# Altium footprint library Connectors.PcbLib: 228 footprints (part 7 of 15)
Each footprint in its own frame and in the unit in brackets; x right, y up, seen from the top. Pads: shape width x height; smd on the part's side, far side on the other; paste and mask are expansions set on the pad; w line width, h text height; cw(c..) or ccw(c..) is an arc to the next point about the centre after c.
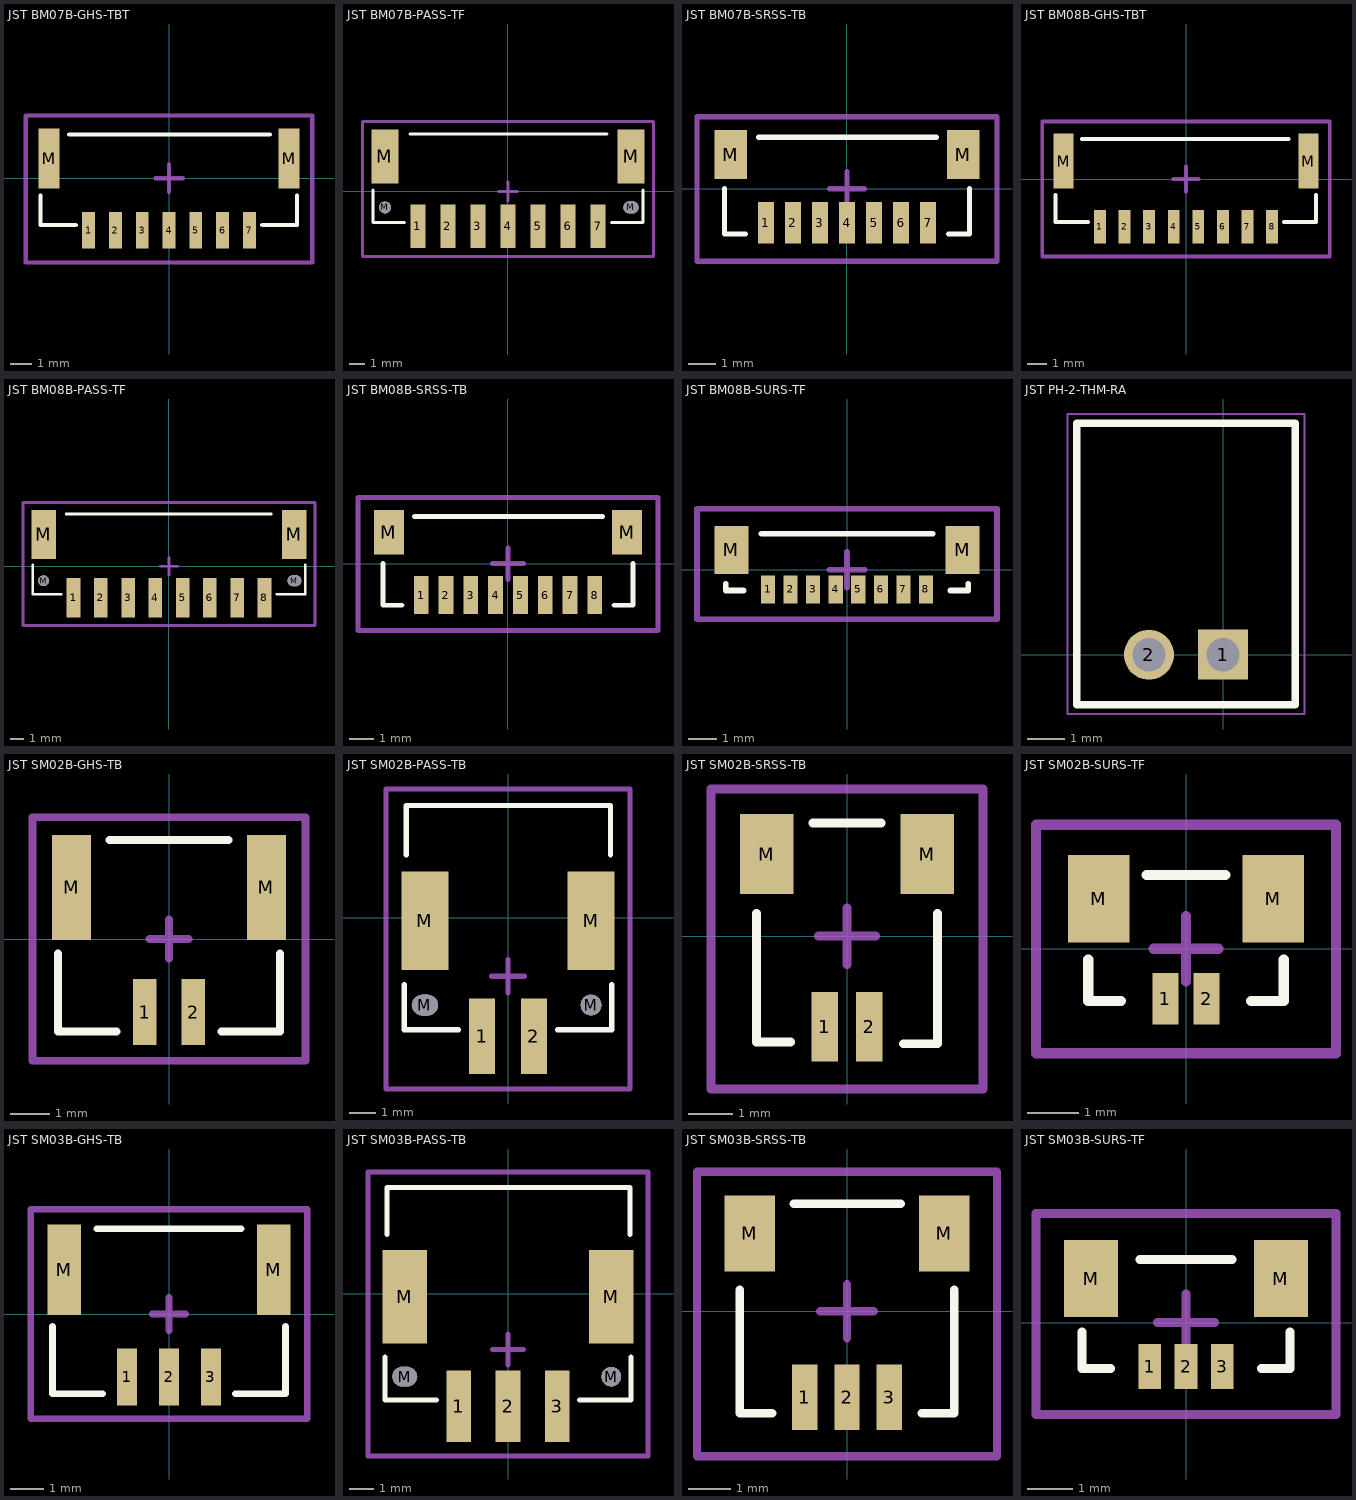
[diagram p6: the footprints below, top view; thin cyan lines are the x and y axes]

## JST BM07B-GHS-TBT [mm] "JST GH Series 1.25mm pitch, top entry connector"
height 4.5
pads (9):
  rect 0.6x1.7 smd: 1(-3.75,-2.437) 2(-2.5,-2.437) 3(-1.25,-2.437) 4(0,-2.437) 5(1.25,-2.437) 6(2.5,-2.437) 7(3.75,-2.437)
  rect 1x2.8 smd: M(-5.6,0.913) M(5.6,0.913)
Top Overlay:
  lines w0.2: -6,-0.812 -6,-2.187 -4.35,-2.187 ; -4.659,2.032 4.699,2.032 ; 4.35,-2.187 5.975,-2.187 5.975,-0.812
Top Courtyard:
  lines w0.2: -0.635,0 0.635,0 ; 0,-0.635 0,0.635 ; -6.681,-3.937 -6.681,2.921 6.681,2.921 6.681,-3.937 -6.681,-3.937
3D body "JST BM07B-GHS-TBT.STEP": height 4.18, standoff -0.03, extent -6,-2.918 6,2.032

## JST BM07B-PASS-TF [mm] "JST PA Series 2mm pitch, top entry connector"
height 11.1
pads (11):
  rect 1x2.9 smd: 1(-6,-2.325) 2(-4,-2.325) 3(-2,-2.325) 4(0,-2.325) 5(2,-2.325) 6(4,-2.325) 7(6,-2.325)
  round 0.8 hole 0.8 unplated mask+0.102: M(-8.2,-1.075)
  rect 1.8x3.6 smd: M(-8.2,2.325) M(8.2,2.325)
  oval 1x0.8 hole 0.8 slot 1 at 0 deg unplated mask+0.102: M(8.2,-1.075)
Top Overlay:
  lines w0.2: -9,0.075 -9,-2.075 -6.905,-2.075 ; -6.54,3.81 6.604,3.81 ; 6.905,-2.075 9,-2.075 9,0.075
Top Courtyard:
  lines w0.2: -0.635,-0.015 0.635,-0.015 ; 0,-0.65 0,0.62 ; -9.699,-4.357 9.699,-4.357 9.699,4.66 -9.699,4.66 -9.699,-4.357
3D body "JST BM07B-PASS-TF.STEP": height 9, standoff 0, extent -9,-3.225 9,3.875

## JST BM07B-SRSS-TB [mm] "1.0mm pitch/Disconnectable Crimp style connector"
height 2.95
pads (9):
  rect 0.6x1.55 smd: 1(-3,-1.262) 2(-2,-1.262) 3(-1,-1.262) 4(0,-1.262) 5(1,-1.262) 6(2,-1.262) 7(3,-1.262)
  rect 1.2x1.8 smd: M(-4.3,1.262) M(4.3,1.262)
Top Overlay:
  lines w0.2: -4.532,0.008 -4.532,-1.676 -3.77,-1.676 ; -3.27,1.905 3.302,1.905 ; 3.77,-1.676 4.532,-1.676 4.532,0.008
Top Courtyard:
  lines w0.2: -0.635,0 0.635,0 ; 0,-0.635 0,0.635 ; -5.548,-2.692 5.548,-2.692 5.548,2.667 -5.548,2.667 -5.548,-2.692
3D body "JST BM07B-SRSS-TB.STEP": height 4.32, standoff 0, extent -4.5,-1.688 4.5,1.912

## JST BM08B-GHS-TBT [mm] "JST GH Series 1.25mm pitch, top entry connector"
height 4.5
pads (10):
  rect 0.6x1.7 smd: 1(-4.375,-2.437) 2(-3.125,-2.437) 3(-1.875,-2.437) 4(-0.625,-2.437) 5(0.625,-2.437) 6(1.875,-2.437) 7(3.125,-2.437) 8(4.375,-2.437)
  rect 1x2.8 smd: M(-6.225,0.913) M(6.225,0.913)
Top Overlay:
  lines w0.2: -6.625,-0.812 -6.625,-2.187 -4.975,-2.187 ; -5.284,2.032 5.207,2.032 ; 4.975,-2.187 6.6,-2.187 6.6,-0.812
Top Courtyard:
  lines w0.2: -0.635,0 0.635,0 ; 0,-0.635 0,0.635 ; -7.306,-3.937 7.306,-3.937 7.306,2.921 -7.306,2.921 -7.306,-3.937
3D body "JST BM08B-GHS-TBT.STEP": height 4.18, standoff -0.03, extent -6.625,-2.918 6.625,2.032

## JST BM08B-PASS-TF [mm] "JST PA Series 2mm pitch, top entry connector"
height 11.1
pads (12):
  rect 1x2.9 smd: 1(-7,-2.325) 2(-5,-2.325) 3(-3,-2.325) 4(-1,-2.325) 5(1,-2.325) 6(3,-2.325) 7(5,-2.325) 8(7,-2.325)
  round 0.8 hole 0.8 unplated mask+0.102: M(-9.2,-1.075)
  rect 1.8x3.6 smd: M(-9.2,2.325) M(9.2,2.325)
  oval 1x0.8 hole 0.8 slot 1 at 0 deg unplated mask+0.102: M(9.2,-1.075)
Top Overlay:
  lines w0.2: -10,0.075 -10,-2.075 -7.905,-2.075 ; -7.54,3.81 7.493,3.81 ; 7.905,-2.075 10,-2.075 10,0.075
Top Courtyard:
  lines w0.2: -0.635,-0.015 0.635,-0.015 ; 0,-0.65 0,0.62 ; -10.699,-4.357 -10.699,4.66 10.699,4.66 10.699,-4.357 -10.699,-4.357
3D body "JST BM08B-PASS-TF.STEP": height 9, standoff 0, extent -10,-3.225 10,3.875

## JST BM08B-SRSS-TB [mm] "1.0mm pitch/Disconnectable Crimp style connector"
height 2.95
pads (10):
  rect 0.6x1.55 smd: 1(-3.5,-1.262) 2(-2.5,-1.262) 3(-1.5,-1.262) 4(-0.5,-1.262) 5(0.5,-1.262) 6(1.5,-1.262) 7(2.5,-1.262) 8(3.5,-1.262)
  rect 1.2x1.8 smd: M(-4.8,1.262) M(4.8,1.262)
Top Overlay:
  lines w0.2: -5.032,0.008 -5.032,-1.676 -4.27,-1.676 ; -3.77,1.905 3.81,1.905 ; 4.27,-1.676 5.032,-1.676 5.032,0.008
Top Courtyard:
  lines w0.2: -0.635,0 0.635,0 ; 0,-0.635 0,0.635 ; -6.048,-2.692 6.048,-2.692 6.048,2.667 -6.048,2.667 -6.048,-2.692
3D body "JST BM08B-SRSS-TB.STEP": height 4.32, standoff 0, extent -5,-1.688 5,1.912

## JST BM08B-SURS-TF [mm] "1.0mm pitch/Disconnectable Crimp style connector"
height 3.95
pads (10):
  rect 0.5x1 smd: 1(-2.8,-0.7) 2(-2,-0.7) 3(-1.2,-0.7) 4(-0.4,-0.7) 5(0.4,-0.7) 6(1.2,-0.7) 7(2,-0.7) 8(2.8,-0.7)
  rect 1.2x1.7 smd: M(-4.1,0.7) M(4.1,0.7)
Top Overlay:
  lines w0.2: -4.305,-0.5 -4.305,-0.741 -3.67,-0.741 ; -3.035,1.27 3.048,1.27 ; 3.67,-0.741 4.305,-0.741 4.305,-0.5
Top Courtyard:
  lines w0.2: -0.635,0 0.635,0 ; 0,-0.635 0,0.635 ; -5.321,-1.757 -5.321,2.159 5.321,2.159 5.321,-1.757 -5.321,-1.757
3D body "JST BM08B-SURS-TF.STEP": height 2.75, standoff 0, extent -4.3,-1.016 4.3,1.234

## JST PH-2-THM-RA [mm]
pads (2):
  rect 1.35x1.35 hole 0.9: 1(0,0)
  round 1.35 hole 0.9: 2(-2,0)
Top Overlay:
  lines w0.2: -3.95,-1.35 1.95,-1.35 1.95,6.25 -3.95,6.25 -3.95,-1.35
Top Component Outline:
  lines w0.1: -3.95,-1.35 -3.95,6.25 1.95,6.25 1.95,-1.35 -3.95,-1.35
Top Courtyard:
  lines w0.05: -4.2,-1.6 -4.2,6.5 2.2,6.5 2.2,-1.6 -4.2,-1.6
3D body "JST PH-2-THM-RA.step": height 4.9, standoff -3.3, extent -4,-1.35 1.9,6.25

## JST SM02B-GHS-TB [mm] "1.25mm pitch/Disconnectable Crimp style connectors"
height 4.35
pads (4):
  rect 0.6x1.7 smd: 1(-0.625,-1.875) 2(0.625,-1.875)
  rect 1x2.7 smd: M(-2.5,1.325) M(2.5,1.325)
Top Overlay:
  lines w0.2: -2.85,-0.375 -2.85,-2.375 -1.35,-2.375 ; -1.524,2.54 1.524,2.54 ; 1.35,-2.375 2.85,-2.375 2.85,-0.375
Top Courtyard:
  lines w0.2: -0.5,0 0.5,0 ; 0,-0.5 0,0.5 ; -3.5,-3.125 3.5,-3.125 3.5,3.125 -3.5,3.125 -3.5,-3.125
3D body: height 4.35, standoff 0, extent -2.875,-2.31 2.875,2.54

## JST SM02B-PASS-TB [mm] "JST PA Series 2mm pitch, side entry connector"
height 5.7
pads (6):
  rect 1x2.9 smd: 1(-1,-4.575) 2(1,-4.575)
  oval 1x0.8 hole 0.8 slot 1 at 0 deg unplated mask+0.102: M(-3.2,-3.375)
  rect 1.8x3.8 smd: M(-3.2,-0.125) M(3.2,-0.125)
  round 0.8 hole 0.8 unplated mask+0.102: M(3.2,-3.375)
Top Overlay:
  lines w0.2: -4,-2.575 -4,-4.325 -1.905,-4.325 ; -3.921,2.41 -3.921,4.315 3.953,4.315 3.953,2.41 ; 1.905,-4.325 4,-4.325 4,-2.575
Top Courtyard:
  lines w0.2: -0.635,-2.265 0.635,-2.265 ; 0,-2.9 0,-1.63 ; -4.699,-6.607 4.699,-6.607 4.699,4.953 -4.699,4.953 -4.699,-6.607
3D body "JST SM02B-PASS-TB.STEP": height 5.8, standoff 0, extent -4,-5.641 4,4.359

## JST SM02B-SRSS-TB [mm] "1.0mm pitch/Disconnectable Crimp style connector"
height 2.95
pads (4):
  rect 0.6x1.55 smd: 1(-0.5,-2.032) 2(0.5,-2.032)
  rect 1.2x1.8 smd: M(-1.8,1.843) M(1.8,1.843)
Top Overlay:
  lines w0.2: -2.032,0.508 -2.032,-2.372 -1.27,-2.372 ; -0.762,2.54 0.762,2.54 ; 1.27,-2.413 2.032,-2.413 2.032,0.508
Top Courtyard:
  lines w0.2: -0.635,0 0.635,0 ; 0,-0.635 0,0.635 ; -3.048,-3.429 -3.048,3.302 3.048,3.302 3.048,-3.429 -3.048,-3.429
3D body "JST SM02B-SRSS-TB.STEP": height 2.95, standoff -0.01, extent -2,-2.383 2,2.567

## JST SM02B-SURS-TF [mm] "1.0mm pitch/Disconnectable Crimp style connector"
height 2.95
pads (4):
  rect 0.5x1 smd: 1(-0.4,-0.975) 2(0.4,-0.975)
  rect 1.2x1.7 smd: M(-1.7,0.975) M(1.7,0.975)
Top Overlay:
  lines w0.2: -1.905,-0.213 -1.905,-1.016 -1.27,-1.016 ; -0.762,1.438 0.762,1.438 ; 1.27,-1.016 1.905,-1.016 1.905,-0.213
Top Courtyard:
  lines w0.2: -0.635,0 0.635,0 ; 0,-0.635 0,0.635 ; -2.921,-2.032 -2.921,2.413 2.921,2.413 2.921,-2.032 -2.921,-2.032
3D body "JST SM02B-SURS-TF.STEP": height 1.75, standoff 0, extent -1.9,-1.262 1.9,1.438

## JST SM03B-GHS-TB [mm] "1.25mm pitch/Disconnectable Crimp style connectors"
height 4.35
pads (5):
  rect 0.6x1.7 smd: 1(-1.25,-1.875) 2(0,-1.875) 3(1.25,-1.875)
  rect 1x2.7 smd: M(-3.125,1.325) M(3.125,1.325)
Top Overlay:
  lines w0.2: -3.475,-0.375 -3.475,-2.375 -1.975,-2.375 ; -2.149,2.54 2.159,2.54 ; 1.975,-2.375 3.475,-2.375 3.475,-0.375
Top Courtyard:
  lines w0.2: -0.5,0 0.5,0 ; 0,-0.5 0,0.5 ; -4.125,-3.125 4.125,-3.125 4.125,3.125 -4.125,3.125 -4.125,-3.125
3D body "JST SM03B-GHS-TB.STEP": height 4.35, standoff 0, extent -3.5,-2.31 3.5,2.54

## JST SM03B-PASS-TB [mm] "JST PA Series 2mm pitch, side entry connector"
height 5.7
pads (7):
  rect 1x2.9 smd: 1(-2,-4.575) 2(0,-4.575) 3(2,-4.575)
  oval 1x0.8 hole 0.8 slot 1 at 0 deg unplated mask+0.102: M(-4.2,-3.375)
  rect 1.8x3.8 smd: M(-4.2,-0.125) M(4.2,-0.125)
  round 0.8 hole 0.8 unplated mask+0.102: M(4.2,-3.375)
Top Overlay:
  lines w0.2: -5,-2.575 -5,-4.325 -2.905,-4.325 ; -4.921,2.41 -4.921,4.315 4.953,4.315 4.953,2.41 ; 2.905,-4.325 5,-4.325 5,-2.575
Top Courtyard:
  lines w0.2: -0.635,-2.265 0.635,-2.265 ; 0,-2.9 0,-1.63 ; -5.699,-6.607 -5.699,4.953 5.699,4.953 5.699,-6.607 -5.699,-6.607
3D body "JST SM03B-PASS-TB.STEP": height 5.8, standoff 0, extent -5,-5.641 5,4.359

## JST SM03B-SRSS-TB [mm] "1.0mm pitch/Disconnectable Crimp style connector"
height 2.95
pads (5):
  rect 0.6x1.55 smd: 1(-1,-2.032) 2(0,-2.032) 3(1,-2.032)
  rect 1.2x1.8 smd: M(-2.3,1.843) M(2.3,1.843)
Top Overlay:
  lines w0.2: -2.532,0.508 -2.532,-2.413 -1.77,-2.413 ; -1.262,2.54 1.27,2.54 ; 1.77,-2.413 2.532,-2.413 2.532,0.508
Top Courtyard:
  lines w0.2: -0.635,0 0.635,0 ; 0,-0.635 0,0.635 ; -3.548,-3.429 -3.548,3.302 3.548,3.302 3.548,-3.429 -3.548,-3.429
3D body "JST SM03B-SRSS-TB.STEP": height 2.95, standoff -0.01, extent -2.5,-2.383 2.5,2.567

## JST SM03B-SURS-TF [mm] "1.0mm pitch/Disconnectable Crimp style connector"
height 2.95
pads (5):
  rect 0.5x1 smd: 1(-0.8,-0.975) 2(0,-0.975) 3(0.8,-0.975)
  rect 1.2x1.7 smd: M(-2.1,0.975) M(2.1,0.975)
Top Overlay:
  lines w0.2: -2.305,-0.213 -2.305,-1.016 -1.67,-1.016 ; -1.016,1.397 1.016,1.397 ; 1.67,-1.016 2.305,-1.016 2.305,-0.213
Top Courtyard:
  lines w0.2: -0.635,0 0.635,0 ; 0,-0.635 0,0.635 ; -3.321,-2.032 -3.321,2.413 3.321,2.413 3.321,-2.032 -3.321,-2.032
3D body "JST SM03B-SURS-TF.STEP": height 1.75, standoff 0, extent -2.3,-1.243 2.3,1.457